# Altium footprint library CUI_PJ1-021-SMT-TR.PcbLib: 1 footprints
Each footprint in its own frame and in the unit in brackets; x right, y up, seen from the top. Pads: shape width x height; smd on the part's side, far side on the other; paste and mask are expansions set on the pad; w line width, h text height; cw(c..) or ccw(c..) is an arc to the next point about the centre after c.
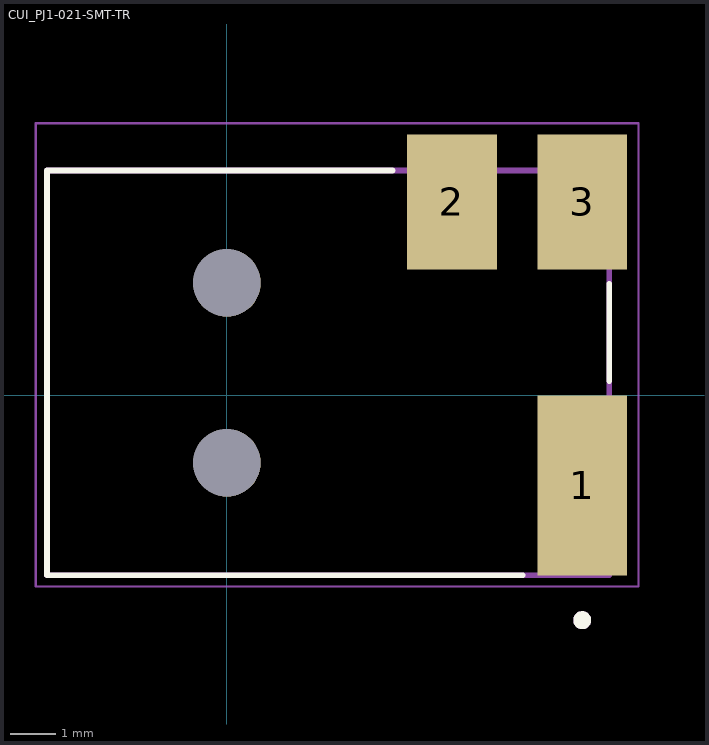
[diagram p0: the footprint, top view; thin cyan lines are the x and y axes]

## CUI_PJ1-021-SMT-TR [mm]
height 6
pads (5):
  rect 2x4 smd: 1(7.9,-2)
  rect 2x3 smd: 2(5,4.3) 3(7.9,4.3)
  round 1.5 hole 1.5 unplated: ""(0,-1.5) ""(0,2.5)
Top Overlay:
  circle w0.2: c7.9,-5 r0.1
  lines w0.127: 3.68,5 -4,5 -4,-4 6.58,-4 ; 8.5,0.32 8.5,2.48
Assembly Top:
  circle w0.2: c7.9,-5 r0.1
  lines w0.127: -4,-4 8.5,-4 8.5,5 -4,5 -4,-4
Courtyard Top:
  lines w0.05: -4.25,-4.25 9.15,-4.25 9.15,6.05 -4.25,6.05 -4.25,-4.25
3D body "step_temp.STEP": height 5.98, standoff -1.02, extent -3.937,-3.938 8.563,5.462